# Altium schematic symbol library TQP7M9106.SchLib: 1 symbol
Pins are listed as number, name and electrical type; pins without a type are passive.

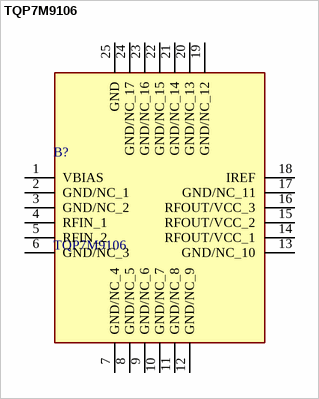
[diagram p0: symbol TQP7M9106]

## TQP7M9106
designator B?
RF Amplifier IC CDMA, LTE, W-CDMA 50MHz ~ 1.5GHz 24-QFN (4x4), 4.75V ~ 5.25V; Manufacturer_Name: Qorvo; Geometry.Height: 0.9mm; Mouser Part Number: 772-TQP7M9106; Mouser Price/Stock: https://www.mouser.co.uk/ProductDetail/Qorvo/TQP7M9106?qs=ZyJ8JrQCoIZWZMWEw%252BwsMg%3D%3D; Manufacturer_Part_Number: TQP7M9106; Datasheet Link: https://www.qorvo.com/products/p/TQP7M9106#documents
footprint QFN50P400X400X90-25N-D
pins: 1 VBIAS, 2 GND/NC_1, 3 GND/NC_2, 4 RFIN_1, 5 RFIN_2, 6 GND/NC_3, 7 GND/NC_4, 8 GND/NC_5, 9 GND/NC_6, 10 GND/NC_7, 11 GND/NC_8, 12 GND/NC_9, 13 GND/NC_10, 14 RFOUT/VCC_1, 15 RFOUT/VCC_2, 16 RFOUT/VCC_3, 17 GND/NC_11, 18 IREF, 19 GND/NC_12, 20 GND/NC_13, 21 GND/NC_14, 22 GND/NC_15, 23 GND/NC_16, 24 GND/NC_17, 25 GND